# Altium schematic symbol library 1984617.SchLib: 1 symbol
Pins are listed as number, name and electrical type; pins without a type are passive.

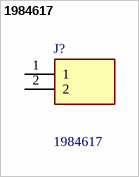
[diagram p0: symbol 1984617]

## 1984617
designator J?
PT 1,5/ 2-3,5-H - Printed circuit board terminal, nominal current: 17.5 A, rated voltage (III/2): 200 V, nominal cross section: 1.5 mm<sup>2</sup>, number of potentials: 2, number of rows: 1, number of positions per row: 2, product range: PT 1,5/..-H, pitch: 3.5 mm, connection method: Screw connection with wire protector, screw head form: H1L Slotted Phillips recess, mounting: Wave soldering, conductor/PCB connection direction: 0 , color: green, Pin layout: Linear pinning, Solder pin [P]: 4.5 mm, number of; Manufacturer_Name: Phoenix Contact; Geometry.Height: 9.3mm; Manufacturer_Part_Number: 1984617; Mouser Part Number: 651-1984617; Mouser Price/Stock: https://www.mouser.co.uk/ProductDetail/Phoenix-Contact/1984617?qs=ATjOrvm3mOhUrGlJQoUcpQ%3D%3D; Arrow Part Number: 1984617; Arrow Price/Stock: https://www.arrow.com/en/products/1984617/phoenix-contact.html?utm_currency=USD&region=nac; Datasheet Link: https://www.phoenixcontact.com/en-us/products/printed-circuit-board-terminal-pt-15-2-35-h-1984617?type=pdf
footprint 1984617
pins: 1, 2